# Altium footprint library 2019-09-14_13-18-58.PcbLib: 3 footprints
Each footprint in its own frame and in the unit in brackets; x right, y up, seen from the top. Pads: shape width x height; smd on the part's side, far side on the other; paste and mask are expansions set on the pad; w line width, h text height; cw(c..) or ccw(c..) is an arc to the next point about the centre after c.
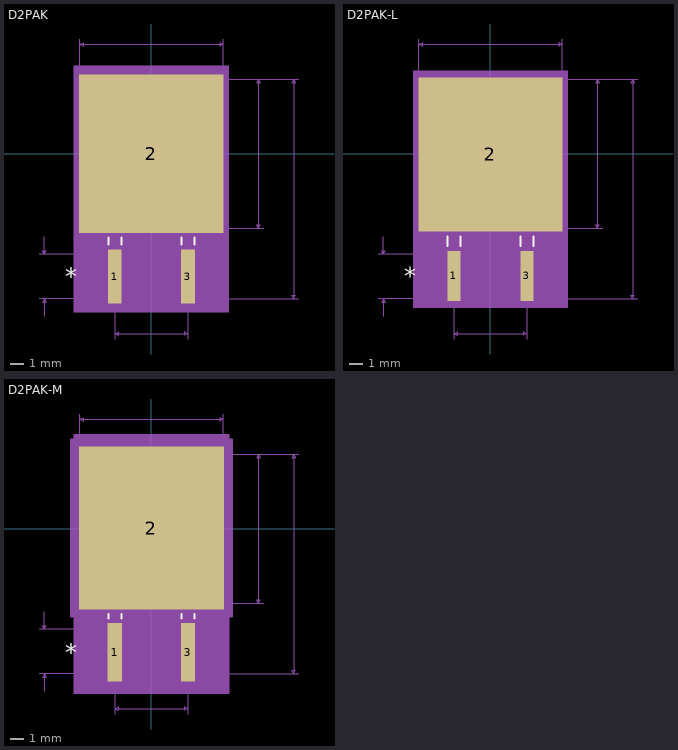
[diagram p0: the footprints below, top view; thin cyan lines are the x and y axes]

## D2PAK [mil]
pads (3):
  rect 39x154 smd paste+0 mask+0: 1(-103.94,-349.5) 3(103.94,-349.5)
  rect 411x451 smd paste+0 mask+0: 2(0,0)
Top Overlay:
  lines w6: -122.44,-258.5 -122.44,-238.6 ; -85.44,-258.5 -85.44,-238.6 ; 85.44,-258.5 85.44,-238.6 ; 122.44,-258.5 122.44,-238.6
  text "*" at -245.37,-374.5 h50
Mechanical 5:
  region: -220.5,250.5 220.5,250.5 220.5,-451.5 -220.5,-451.5
Mechanical 7:
  lines w1: -319.5,-412.5 0,-412.5 419.5,-412.5 ; -319.5,-286.5 0,-286.5 ; -304.5,-462.5 -304.5,-412.5 ; -304.5,-236.5 -304.5,-286.5 ; -204.5,0 -204.5,326.5 ; -103.94,-527 -103.94,-312 ; 0,-211.5 319.5,-211.5 ; 103.94,-527 103.94,-312 ; 204.5,0 204.5,326.5 ; 319.5,211.5 0,211.5 419.5,211.5 ; -304.5,-412.5 -309.5,-422.5 -299.5,-422.5 -304.5,-412.5 ; -304.5,-286.5 -309.5,-276.5 -299.5,-276.5 -304.5,-286.5 ; -204.5,311.5 204.5,311.5 ; -204.5,311.5 -194.5,316.5 -194.5,306.5 -204.5,311.5 ; -103.94,-512 103.94,-512 ; -103.94,-512 -93.94,-507 -93.94,-517 -103.94,-512 ; 103.94,-512 93.94,-507 93.94,-517 103.94,-512 ; 204.5,311.5 194.5,316.5 194.5,306.5 204.5,311.5 ; 304.5,-211.5 304.5,211.5 ; 304.5,-211.5 299.5,-201.5 309.5,-201.5 304.5,-211.5 ; 304.5,211.5 299.5,201.5 309.5,201.5 304.5,211.5 ; 404.5,-412.5 404.5,211.5 ; 404.5,-412.5 399.5,-402.5 409.5,-402.5 404.5,-412.5 ; 404.5,211.5 399.5,201.5 409.5,201.5 404.5,211.5
  text "Default Padstyle: RX39Y154D0T" at -362.5,-762.5 h50
  text "Large Padstyle: RX411Y451D0T" at -350,-837.5 h50
  text "Alt 1 Padstyle: OX60Y90D30P" at -337.5,-912.5 h50
  text "Alt 2 Padstyle: OX90Y60D30P" at -337.5,-987.5 h50
  text "0.423in/10.744mm" at 324.5,-12.5 h25
  text "0.409in/10.389mm" at -100,331.5 h25
  text "0.624in/15.85mm" at 424.5,-150.5 h25
  text "0.126in/3.2mm" at -487,-362 h25
  text "0.208in/5.28mm" at -87.5,-557 h25
Mechanical 13:
  lines w1: -27.5,-211.5 -27.5,-280.5 27.5,-280.5 27.5,-211.5 ; -204.5,-211.5 204.5,-211.5 204.5,211.5 -204.5,211.5 -204.5,-211.5 ; -122.44,-412.5 -122.44,-211.5 -85.44,-211.5 -85.44,-412.5 -122.44,-412.5 ; 85.44,-412.5 85.44,-211.5 122.44,-211.5 122.44,-412.5 85.44,-412.5
  text "*" at -116.44,-226.5 h50
Mechanical 15:
  region: -132.44,-235.5 -216.5,-235.5 -216.5,235.5 216.5,235.5 216.5,-235.5 132.44,-235.5 132.44,-436.5 75.44,-436.5 75.44,-282.5 -75.44,-282.5 -75.44,-436.5 -132.44,-436.5
  lines w6: -216.5,-235.5 -216.5,235.5 216.5,235.5 216.5,-235.5 132.44,-235.5 132.44,-436.5 75.44,-436.5 75.44,-282.5 -75.44,-282.5 -75.44,-436.5 -132.44,-436.5 -132.44,-235.5 -216.5,-235.5
3D body: height 10, standoff 0, extent 0,0 10,10

## D2PAK-L [mil]
pads (3):
  rect 37x142 smd paste+0 mask+0: 1(-103.94,-347.5) 3(103.94,-347.5)
  rect 409x439 smd paste+0 mask+0: 2(0,-2)
Top Overlay:
  lines w6: -122.44,-262.5 -122.44,-235.5 ; -85.44,-262.5 -85.44,-235.5 ; 85.44,-262.5 85.44,-235.5 ; 122.44,-262.5 122.44,-235.5
  text "*" at -245.37,-372.5 h50
Mechanical 5:
  region: -219.5,236.5 219.5,236.5 219.5,-437.5 -219.5,-437.5
Mechanical 7:
  lines w1: -319.5,-412.5 0,-412.5 419.5,-412.5 ; -319.5,-286.5 0,-286.5 ; -304.5,-462.5 -304.5,-412.5 ; -304.5,-236.5 -304.5,-286.5 ; -204.5,0 -204.5,326.5 ; -103.94,-527 -103.94,-312 ; 0,-211.5 319.5,-211.5 ; 103.94,-527 103.94,-312 ; 204.5,0 204.5,326.5 ; 319.5,211.5 0,211.5 419.5,211.5 ; -304.5,-412.5 -309.5,-422.5 -299.5,-422.5 -304.5,-412.5 ; -304.5,-286.5 -309.5,-276.5 -299.5,-276.5 -304.5,-286.5 ; -204.5,311.5 204.5,311.5 ; -204.5,311.5 -194.5,316.5 -194.5,306.5 -204.5,311.5 ; -103.94,-512 103.94,-512 ; -103.94,-512 -93.94,-507 -93.94,-517 -103.94,-512 ; 103.94,-512 93.94,-507 93.94,-517 103.94,-512 ; 204.5,311.5 194.5,316.5 194.5,306.5 204.5,311.5 ; 304.5,-211.5 304.5,211.5 ; 304.5,-211.5 299.5,-201.5 309.5,-201.5 304.5,-211.5 ; 304.5,211.5 299.5,201.5 309.5,201.5 304.5,211.5 ; 404.5,-412.5 404.5,211.5 ; 404.5,-412.5 399.5,-402.5 409.5,-402.5 404.5,-412.5 ; 404.5,211.5 399.5,201.5 409.5,201.5 404.5,211.5
  text "Default Padstyle: RX37Y142D0T" at -362.5,-762.5 h50
  text "Large Padstyle: RX409Y439D0T" at -350,-837.5 h50
  text "Alt 1 Padstyle: OX60Y90D30P" at -337.5,-912.5 h50
  text "Alt 2 Padstyle: OX90Y60D30P" at -337.5,-987.5 h50
  text "0.423in/10.744mm" at 324.5,-12.5 h25
  text "0.409in/10.389mm" at -100,331.5 h25
  text "0.624in/15.85mm" at 424.5,-148.5 h25
  text "0.126in/3.2mm" at -487,-362 h25
  text "0.208in/5.28mm" at -87.5,-557 h25
Mechanical 13:
  lines w1: -27.5,-211.5 -27.5,-280.5 27.5,-280.5 27.5,-211.5 ; -204.5,-211.5 204.5,-211.5 204.5,211.5 -204.5,211.5 -204.5,-211.5 ; -122.44,-412.5 -122.44,-211.5 -85.44,-211.5 -85.44,-412.5 -122.44,-412.5 ; 85.44,-412.5 85.44,-211.5 122.44,-211.5 122.44,-412.5 85.44,-412.5
  text "*" at -116.44,-226.5 h50
Mechanical 15:
  region: -126.44,-225.5 -208.5,-225.5 -208.5,221.5 208.5,221.5 208.5,-225.5 126.44,-225.5 126.44,-422.5 81.44,-422.5 81.44,-280.5 -81.44,-280.5 -81.44,-422.5 -126.44,-422.5
  lines w6: -208.5,-225.5 -208.5,221.5 208.5,221.5 208.5,-225.5 126.44,-225.5 126.44,-422.5 81.44,-422.5 81.44,-280.5 -81.44,-280.5 -81.44,-422.5 -126.44,-422.5 -126.44,-225.5 -208.5,-225.5
3D body: height 10, standoff 0, extent 0,0 10,10

## D2PAK-M [mil]
pads (3):
  rect 41x166 smd paste+0 mask+0: 1(-103.94,-351.5) 3(103.94,-351.5)
  rect 413x463 smd paste+0 mask+0: 2(0,2)
Top Overlay:
  lines w6: -122.44,-254.5 -122.44,-242.6 ; -85.44,-254.5 -85.44,-242.6 ; 85.44,-254.5 85.44,-242.6 ; 122.44,-254.5 122.44,-242.6
  text "*" at -245.37,-376.5 h50
Mechanical 5:
  region: -221.5,268.5 221.5,268.5 221.5,-469.5 -221.5,-469.5
Mechanical 7:
  lines w1: -319.5,-412.5 0,-412.5 419.5,-412.5 ; -319.5,-286.5 0,-286.5 ; -304.5,-462.5 -304.5,-412.5 ; -304.5,-236.5 -304.5,-286.5 ; -204.5,0 -204.5,326.5 ; -103.94,-527 -103.94,-312 ; 0,-211.5 319.5,-211.5 ; 103.94,-527 103.94,-312 ; 204.5,0 204.5,326.5 ; 319.5,211.5 0,211.5 419.5,211.5 ; -304.5,-412.5 -309.5,-422.5 -299.5,-422.5 -304.5,-412.5 ; -304.5,-286.5 -309.5,-276.5 -299.5,-276.5 -304.5,-286.5 ; -204.5,311.5 204.5,311.5 ; -204.5,311.5 -194.5,316.5 -194.5,306.5 -204.5,311.5 ; -103.94,-512 103.94,-512 ; -103.94,-512 -93.94,-507 -93.94,-517 -103.94,-512 ; 103.94,-512 93.94,-507 93.94,-517 103.94,-512 ; 204.5,311.5 194.5,316.5 194.5,306.5 204.5,311.5 ; 304.5,-211.5 304.5,211.5 ; 304.5,-211.5 299.5,-201.5 309.5,-201.5 304.5,-211.5 ; 304.5,211.5 299.5,201.5 309.5,201.5 304.5,211.5 ; 404.5,-412.5 404.5,211.5 ; 404.5,-412.5 399.5,-402.5 409.5,-402.5 404.5,-412.5 ; 404.5,211.5 399.5,201.5 409.5,201.5 404.5,211.5
  text "Default Padstyle: RX41Y166D0T" at -362.5,-762.5 h50
  text "Large Padstyle: RX413Y463D0T" at -350,-837.5 h50
  text "Alt 1 Padstyle: OX60Y90D30P" at -337.5,-912.5 h50
  text "Alt 2 Padstyle: OX90Y60D30P" at -337.5,-987.5 h50
  text "0.423in/10.744mm" at 324.5,-12.5 h25
  text "0.409in/10.389mm" at -100,331.5 h25
  text "0.624in/15.85mm" at 424.5,-152.5 h25
  text "0.126in/3.2mm" at -487,-362 h25
  text "0.208in/5.28mm" at -87.5,-557 h25
Mechanical 13:
  lines w1: -27.5,-211.5 -27.5,-280.5 27.5,-280.5 27.5,-211.5 ; -204.5,-211.5 204.5,-211.5 204.5,211.5 -204.5,211.5 -204.5,-211.5 ; -122.44,-412.5 -122.44,-211.5 -85.44,-211.5 -85.44,-412.5 -122.44,-412.5 ; 85.44,-412.5 85.44,-211.5 122.44,-211.5 122.44,-412.5 85.44,-412.5
  text "*" at -116.44,-226.5 h50
Mechanical 15:
  region: -142.44,-249.5 -228.5,-249.5 -228.5,253.5 228.5,253.5 228.5,-249.5 142.44,-249.5 142.44,-454.5 65.44,-454.5 65.44,-288.5 -65.44,-288.5 -65.44,-454.5 -142.44,-454.5
  lines w6: -228.5,-249.5 -228.5,253.5 228.5,253.5 228.5,-249.5 142.44,-249.5 142.44,-454.5 65.44,-454.5 65.44,-288.5 -65.44,-288.5 -65.44,-454.5 -142.44,-454.5 -142.44,-249.5 -228.5,-249.5
3D body: height 10, standoff 0, extent 0,0 10,10